# Altium footprint library amirlib.PcbLib: 456 footprints (part 22 of 29)
Each footprint in its own frame and in the unit in brackets; x right, y up, seen from the top. Pads: shape width x height; smd on the part's side, far side on the other; paste and mask are expansions set on the pad; w line width, h text height; cw(c..) or ccw(c..) is an arc to the next point about the centre after c.
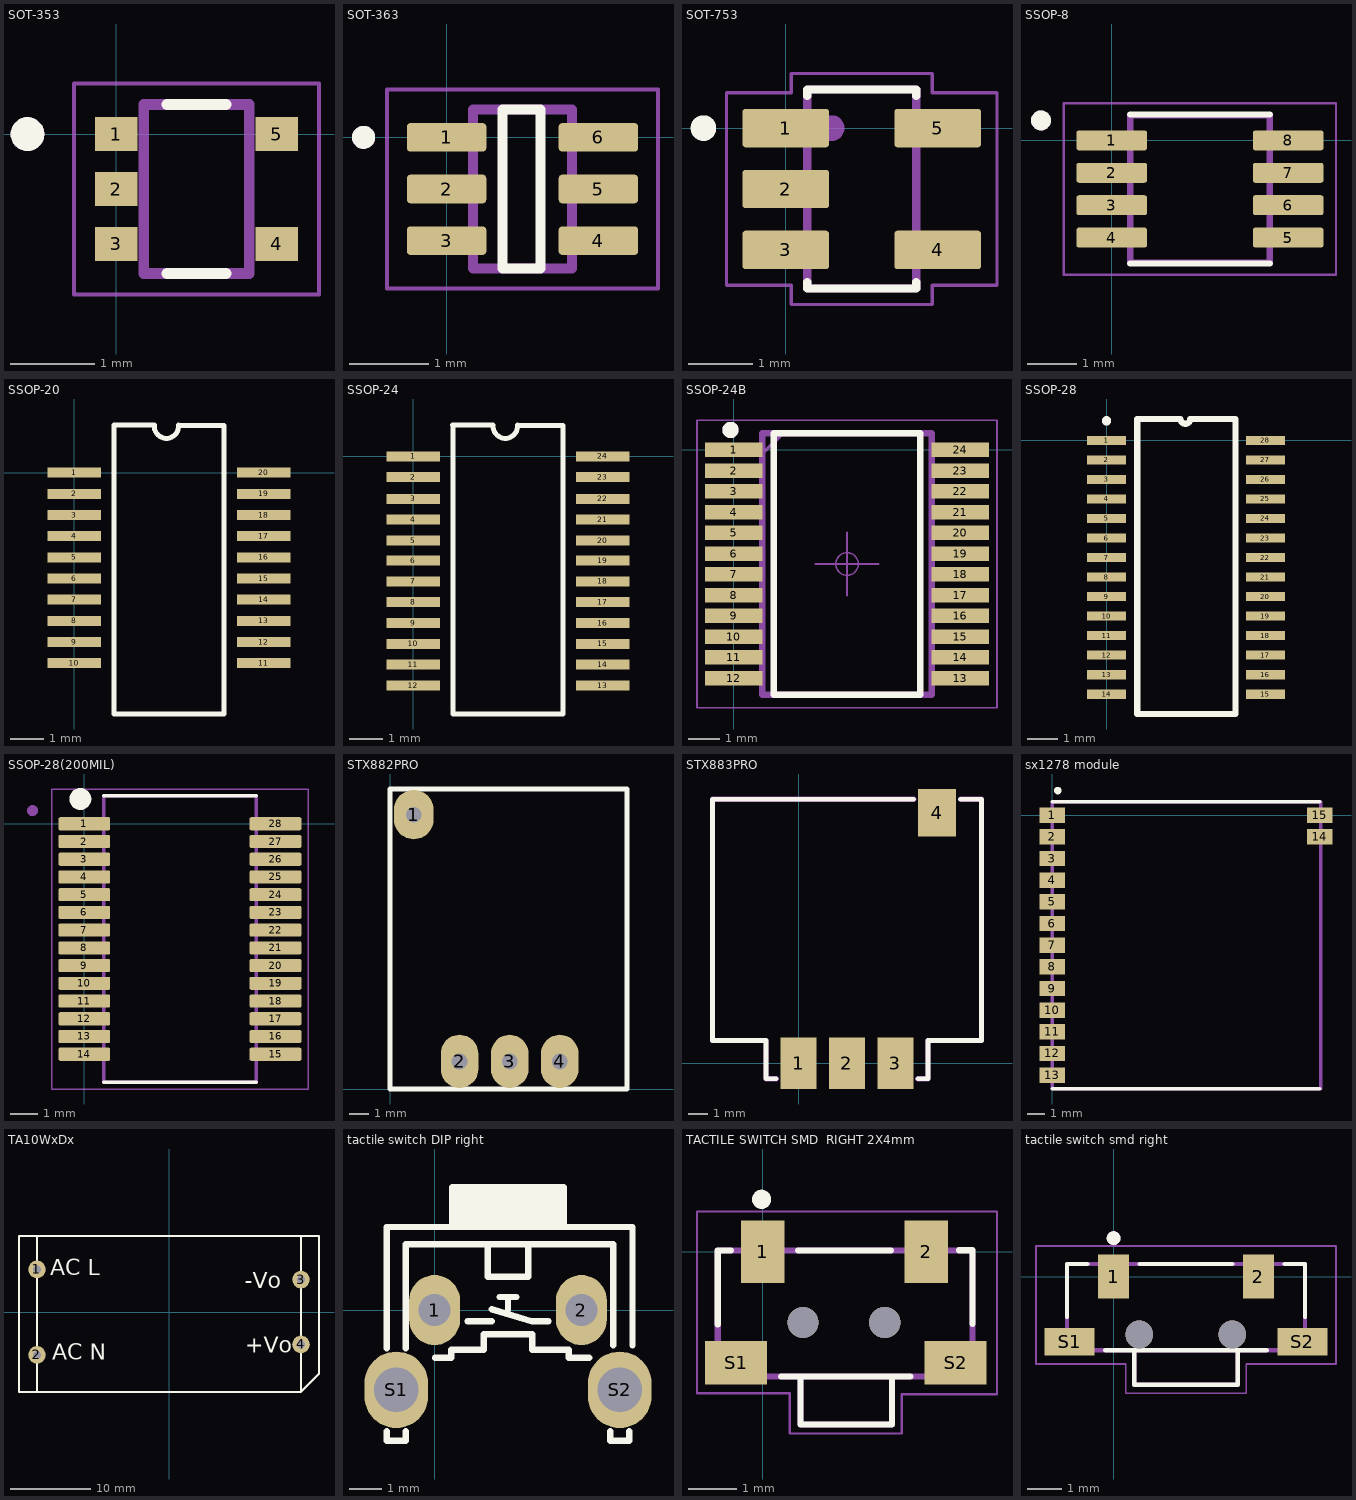
[diagram p21: the footprints below, top view; thin cyan lines are the x and y axes]

## SOT-353 [mm]
pads (5):
  rect 0.5x0.4 smd: 1(0,0) 2(0,-0.65) 3(0,-1.3) 4(1.9,-1.3) 5(1.9,0)
Top Overlay:
  circle w0.2: c-1.05,0 r0.1
  lines w0.127: 0.6,-1.65 1.3,-1.65 ; 0.6,0.35 1.3,0.35
Mechanical 13:
  circle w0.2: c-1.05,0 r0.1
  lines w0.127: 0.325,-1.65 0.325,0.35 1.575,0.35 1.575,-1.65 0.325,-1.65
Mechanical 15:
  lines w0.05: -0.5,-1.9 -0.5,0.6 2.4,0.6 2.4,-1.9 -0.5,-1.9
3D body "step_temp.STEP": height 1.1, standoff 0, extent -0.1,-1.65 2,0.35

## SOT-363 [mm]
pads (6):
  rrect25% 1x0.36 smd paste+0 mask+0.102: 1(0,0) 2(0,-0.65) 3(0,-1.3) 4(1.91,-1.3) 5(1.91,-0.65) 6(1.91,0)
Top Overlay:
  circle w0.15: c-1.045,0 r0.07
  lines w0.127: 0.701,-1.65 1.184,-1.65 1.184,0.35 0.701,0.35 0.701,-1.65
Mechanical 13:
  circle w0.15: c-1.045,0 r0.07
  lines w0.127: 0.33,-1.65 1.58,-1.65 1.58,0.35 0.33,0.35 0.33,-1.65
Mechanical 15:
  lines w0.05: -0.75,-1.9 -0.75,0.6 2.66,0.6 2.66,-1.9 -0.75,-1.9
3D body "MBT3906DW1T1G.STEP": height 1.1, standoff 0, extent -0.095,-1.65 2.005,0.35

## SOT-753 [mm]
pads (5):
  rrect15% 1.35x0.6 smd: 1(0,0) 2(0,-0.95) 3(0,-1.9) 4(2.37,-1.9) 5(2.37,0)
Top Overlay:
  circle w0.2: c-1.284,0 r0.1
  lines w0.127: 0.335,-2.4 0.335,-2.5 2.035,-2.5 2.035,-2.4 ; 0.335,0.5 0.335,0.6 2.035,0.6 2.035,0.5
Mechanical 13:
  circle w0.2: c0.716,0 r0.1
  lines w0.127: 0.335,-2.5 0.335,0.6 2.035,0.6 2.035,-2.5 0.335,-2.5
Mechanical 15:
  lines w0.05: -0.925,-2.45 0.085,-2.45 0.085,-2.75 2.285,-2.75 2.285,-2.45 3.295,-2.45 3.295,0.55 2.285,0.55 2.285,0.85 0.085,0.85 0.085,0.55 -0.925,0.55 -0.925,-2.45
3D body "step_temp.STEP": height 1.4, standoff 0, extent -0.215,-2.45 2.585,0.55

## SSOP-8 [mm]
pads (8):
  rrect25% 1.42x0.4 smd: 1(0,0) 2(0,-0.65) 3(0,-1.3) 4(0,-1.95) 5(3.54,-1.95) 6(3.54,-1.3) 7(3.54,-0.65) 8(3.54,0)
Top Overlay:
  circle w0.2: c-1.42,0.4 r0.1
  lines w0.127: 0.37,-2.47 3.17,-2.47 ; 0.37,0.52 3.17,0.52
Mechanical 13:
  circle w0.2: c-1.42,0.4 r0.1
  lines w0.127: 0.37,-2.45 3.17,-2.45 3.17,0.5 0.37,0.5 0.37,-2.45
Mechanical 15:
  lines w0.05: -0.96,-2.7 4.5,-2.7 4.5,0.75 -0.96,0.75 -0.96,-2.7
3D body "step_temp.STEP": height 1.3, standoff 0, extent -0.23,-2.45 3.77,0.5

## SSOP-20 [mm]
pads (20):
  rect 1.6x0.3 smd: 1(0,0) 2(0,-0.635) 3(0,-1.27) 4(0,-1.905) 5(0,-2.54) 6(0,-3.175) 7(0,-3.81) 8(0,-4.445) 9(0,-5.08) 10(0,-5.715) 11(5.69,-5.715) 12(5.69,-5.08) 13(5.69,-4.445) 14(5.69,-3.81) 15(5.69,-3.175) 16(5.69,-2.54) 17(5.69,-1.905) 18(5.69,-1.27) 19(5.69,-0.635) 20(5.69,0)
Top Overlay:
  lines w0.15: 1.188,1.425 2.404,1.425 ccw(c2.768,1.397) 3.132,1.425 ; 1.194,1.421 1.194,-7.239 4.496,-7.239 4.496,1.421 ; 3.132,1.422 3.604,1.422 4.488,1.422
3D body "User Library-SSOP20.STEP": height 1.53, standoff -0.15, extent 0.066,-7.163 5.979,1.497

## SSOP-24 [mm]
pads (24):
  rect 1.6x0.3 smd: 1(0,0) 2(0,-0.625) 3(0,-1.275) 4(0,-1.9) 5(0,-2.525) 6(0,-3.125) 7(0,-3.75) 8(0,-4.375) 9(0,-5) 10(0,-5.625) 11(0,-6.25) 12(0,-6.875) 13(5.69,-6.875) 14(5.69,-6.25) 15(5.69,-5.625) 16(5.69,-5) 17(5.69,-4.375) 18(5.69,-3.75) 19(5.69,-3.125) 20(5.69,-2.525) 21(5.69,-1.9) 22(5.69,-1.275) 23(5.69,-0.625) 24(5.69,0)
Top Overlay:
  lines w0.15: 1.185,0.934 2.401,0.934 ccw(c2.764,0.906) 3.128,0.934 ; 1.19,0.93 1.19,-7.73 4.492,-7.73 4.492,0.93 ; 3.128,0.931 3.6,0.931 4.484,0.931
3D body: height 0.7, standoff 0, extent 1.146,-7.721 4.446,0.879

## SSOP-24B [mm]
pads (24):
  rect 1.8x0.45 smd paste-2: 1(0,0) 2(0,-0.65) 3(0,-1.3) 4(0,-1.95) 5(0,-2.6) 6(0,-3.25) 7(0,-3.9) 8(0,-4.55) 9(0,-5.2) 10(0,-5.85) 11(0,-6.5) 12(0,-7.15) 13(7.1,-7.15) 14(7.1,-6.5) 15(7.1,-5.85) 16(7.1,-5.2) 17(7.1,-4.55) 18(7.1,-3.9) 19(7.1,-3.25) 20(7.1,-2.6) 21(7.1,-1.95) 22(7.1,-1.3) 23(7.1,-0.65) 24(7.1,0)
Top Overlay:
  circle w0.279: c-0.1,0.625 r0.114
  lines w0.2: 1.25,-7.675 1.25,0.525 5.85,0.525 5.85,-7.675 1.25,-7.675
Top Paste:
  drawing of 216 lines, arcs and shapes, not listed
Mechanical 13:
  circle w0.279: c-0.1,0.625 r0.114
  lines w0.1: 0.9,-0.125 1.55,0.525
  lines w0.2: 0.9,-7.675 0.9,0.525 6.2,0.525 6.2,-7.675 0.9,-7.675
Mechanical 15:
  circle w0.05: c3.55,-3.575 r0.354
  lines w0.05: 2.55,-3.575 4.55,-3.575 ; 3.55,-4.575 3.55,-2.575 ; -1.15,-8.075 -1.15,0.925 8.25,0.925 8.25,-8.075 -1.15,-8.075
3D body "step_temp.STEP": height 2, standoff 0, extent -0.55,-7.475 7.65,0.325

## SSOP-28 [mm]
pads (28):
  rect 1.27x0.3 smd: 1(0,0) 2(0,-0.635) 3(0,-1.27) 4(0,-1.905) 5(0,-2.54) 6(0,-3.175) 7(0,-3.81) 8(0,-4.445) 9(0,-5.08) 10(0,-5.715) 11(0,-6.35) 12(0,-6.985) 13(0,-7.62) 14(0,-8.255) 15(5.17,-8.255) 16(5.17,-7.62) 17(5.17,-6.985) 18(5.17,-6.35) 19(5.17,-5.715) 20(5.17,-5.08) 21(5.17,-4.445) 22(5.17,-3.81) 23(5.17,-3.175) 24(5.17,-2.54) 25(5.17,-1.905) 26(5.17,-1.27) 27(5.17,-0.635) 28(5.17,0)
Top Overlay:
  circle w0.254: c0,0.635 r0.025
  lines w0.2: 1,-8.9 1,0.7 2.404,0.7 ccw(c2.563,0.7) 2.722,0.7 4.2,0.7 4.2,-8.9 1,-8.9
3D body "User Library-SSOP28_LTC1923.STEP": height 1.75, standoff 0, extent -0.503,-9.106 5.685,0.876

## SSOP-28(200MIL) [mm]
pads (28):
  rrect25% 1.9x0.48 smd: 1(0,0) 2(0,-0.65) 3(0,-1.3) 4(0,-1.95) 5(0,-2.6) 6(0,-3.25) 7(0,-3.9) 8(0,-4.55) 9(0,-5.2) 10(0,-5.85) 11(0,-6.5) 12(0,-7.15) 13(0,-7.8) 14(0,-8.45) 15(7.01,-8.45) 16(7.01,-7.8) 17(7.01,-7.15) 18(7.01,-6.5) 19(7.01,-5.85) 20(7.01,-5.2) 21(7.01,-4.55) 22(7.01,-3.9) 23(7.01,-3.25) 24(7.01,-2.6) 25(7.01,-1.95) 26(7.01,-1.3) 27(7.01,-0.65) 28(7.01,0)
Top Overlay:
  circle w0.4: c-0.144,0.909 r0.2
  lines w0.127: 0.705,-9.475 6.305,-9.475 ; 0.705,1.025 6.305,1.025
Mechanical 13:
  circle w0.2: c-1.9,0.48 r0.1
  lines w0.127: 0.705,-9.475 6.305,-9.475 6.305,1.025 0.705,1.025 0.705,-9.475
Mechanical 15:
  lines w0.05: -1.2,-9.725 8.21,-9.725 8.21,1.275 -1.2,1.275 -1.2,-9.725
3D body "User Library-ssop28_model.STEP": height 1.96, standoff -0.04, extent -0.309,-9.323 7.491,0.877

## STX882PRO [mm]
pads (4):
  oval 2x2.5 hole 0.8: 1(1.2,13.9)
  oval 1.9x2.7 hole 0.8: 2(3.52,1.4) 3(6.06,1.4) 4(8.6,1.4)
Top Overlay:
  lines w0.254: 0,0 12,0 12,15.2 0,15.2 0,0
3D body: height 2, standoff 0, extent 0,0 12,15.2
3D body: height 2.1, standoff 0, extent 0.203,12.649 2.184,15.138
3D body: height 2.1, standoff 0, extent 2.529,0.155 4.511,2.645
3D body: height 2.1, standoff 0, extent 5.069,0.155 7.051,2.645
3D body: height 2.1, standoff 0, extent 7.609,0.155 9.591,2.645

## STX883PRO [mm]
pads (4):
  rect 1.9x2.7 smd paste+0 mask+0.051: 1(0,0) 2(2.54,0) 3(5.08,0)
  rect 2x2.5 smd paste+0 mask+0.051: 4(7.27,13.155)
Top Overlay:
  lines w0.254: -1.181,-0.813 -1.715,-0.813 -1.715,1.197 -4.525,1.197 -4.525,13.867 6.039,13.867 ; 6.261,-0.813 6.785,-0.813 6.795,-0.803 6.795,1.197 9.605,1.197 9.605,13.867 8.501,13.867
Mechanical 15:
  region: 6.039,13.74 -4.398,13.74 -4.398,1.325 -1.715,1.325 -1.69,1.325 -1.643,1.305 -1.607,1.269 -1.588,1.223 -1.588,1.198 -1.588,-0.685 -1.181,-0.685 -1.129,-0.685 -1.054,-0.76 -1.054,-0.865 -1.129,-0.939 -1.181,-0.939 -1.715,-0.939 -1.74,-0.939 -1.787,-0.92 -1.823,-0.884 -1.842,-0.838 -1.842,-0.812 -1.842,1.071 -4.525,1.071 -4.55,1.071 -4.597,1.09 -4.633,1.126 -4.652,1.172 -4.652,1.198 -4.652,13.867 -4.652,13.893 -4.633,13.939 -4.597,13.975 -4.55,13.994 -4.525,13.994 6.039,13.994 6.091,13.994 6.166,13.92 6.166,13.815 6.091,13.74
  region: 6.875,-0.902 6.866,-0.911 6.845,-0.925 6.822,-0.935 6.798,-0.939 6.785,-0.939 6.261,-0.939 6.236,-0.939 6.189,-0.92 6.153,-0.884 6.134,-0.838 6.134,-0.812 6.134,-0.787 6.153,-0.741 6.189,-0.705 6.236,-0.685 6.261,-0.685 6.668,-0.685 6.668,1.198 6.668,1.223 6.687,1.269 6.723,1.305 6.77,1.325 6.795,1.325 9.478,1.325 9.478,13.74 8.501,13.74 8.476,13.74 8.429,13.76 8.393,13.796 8.374,13.842 8.374,13.867 8.374,13.893 8.393,13.939 8.429,13.975 8.476,13.994 8.501,13.994 9.605,13.994 9.63,13.994 9.677,13.975 9.713,13.939 9.732,13.893 9.732,13.867 9.732,1.198 9.732,1.172 9.713,1.126 9.677,1.09 9.63,1.071 9.605,1.071 6.922,1.071 6.922,-0.803 6.922,-0.815 6.917,-0.84 6.908,-0.863 6.894,-0.883 6.885,-0.892

## sx1278 module [mm]
pads (15):
  rect 1.5x0.9 smd: 1(0,0) 2(0,-1.27) 3(0,-2.54) 4(0,-3.81) 5(0,-5.08) 6(0,-6.35) 7(0,-7.62) 8(0,-8.89) 9(0,-10.16) 10(0,-11.43) 11(0,-12.7) 12(0,-13.97) 13(0,-15.24) 14(15.7,-1.27) 15(15.7,0)
Top Overlay:
  circle w0.254: c0.33,1.448 r0.092
  lines w0.2: 0,-16.04 15.7,-16.04 ; 0,0.8 15.7,0.8
Mechanical 1:
  lines w0.2: 0,-16.053 15.748,-16.053 15.748,0.8 0,0.8 0,-16.053
3D body "SX1278_mod.STEP": height 2.15, standoff -0.03, extent -0.258,-15.627 16.26,1.372

## TA10WxDx [mm]
pads (4):
  round 2.2 hole 1 paste-2539.97 mask+0.051: 1(-16.528,5.35) 2(-16.528,-5.35) 3(16.528,4.05) 4(16.528,-4.05)
Top Overlay:
  lines w0.254: -16.528,9.465 -16.528,-9.991 -18.778,-9.991 ; 18.722,9.5 -18.778,9.5 -18.778,-9.991 ; -18.778,-9.991 16.528,-9.991 ; 16.528,-9.991 18.778,-7.741 18.778,9.49 16.528,9.49 16.528,-9.991
  text "+Vo" at 9.518,-5.115 h2.03
  text ".Comment" at -9.398,-0.711 h2.03
  text "-Vo" at 9.492,2.962 h2.03
  text "AC L" at -14.866,4.613 h2.03
  text "AC N" at -14.638,-5.978 h2.03

## tactile switch DIP right [mm]
pads (4):
  oval 1.6x2.2 hole 1 mask+0.1: 1(0,0) 2(4.6,0)
  oval 2x2.4 hole 1.4 mask+0.1: S1(-1.2,-2.5) S2(5.8,-2.5)
Top Overlay:
  region: 4.05,3.85 0.55,3.85 0.55,2.6 4.05,2.6
  lines w0.2: -1.5,-3.8 -1.5,-4.1 -0.9,-4.1 -0.9,-3.8 ; -1.5,-1.2 -1.5,2.6 6.2,2.6 6.2,-1.1 ; -0.9,-1.2 -0.9,2.057 1.665,2.057 ; 0.014,-1.499 0.522,-1.499 0.522,-1.245 1.538,-1.245 1.538,-0.762 3.062,-0.762 3.062,-1.245 4.205,-1.245 4.205,-1.499 4.84,-1.499 ; 0.55,2.6 0.55,3.85 4.05,3.85 4.05,2.6 ; 1.03,-0.356 1.792,-0.356 ; 1.792,0.025 3.062,-0.356 3.57,-0.356 ; 2.046,0.406 2.3,0.406 ; 2.3,0.025 2.3,0.406 ; 2.554,0.406 2.3,0.406 ; 5.5,-3.8 5.5,-4.1 6.1,-4.1 6.1,-3.8 ; 5.6,-1.1 5.6,2.057 2.935,2.057 ; 1.665,2.057 1.665,1.041 2.935,1.041 2.935,2.057 ; 1.665,2.057 2.935,2.057
3D body "SKHHLM.STEP": height 7.43, standoff -3.47, extent -1.949,-4.042 6.549,3.858

## TACTILE SWITCH SMD  RIGHT 2X4mm [mm]
pads (4):
  rect 0.9x1.3 smd: 1(0,0) 2(3.404,0)
  rect 1.3x0.9 smd: S1(-0.559,-2.311) S2(4.013,-2.311)
via 0.838,-1.473 diameter 0.65 hole 0.65
via 2.54,-1.473 diameter 0.65 hole 0.65
Top Overlay:
  circle w0.2: c-0.025,1.092 r0.1
  lines w0.127: -0.94,-1.511 -0.94,0.025 -0.66,0.025 ; 0.381,-2.599 3.073,-2.599 2.692,-2.599 2.692,-3.599 0.787,-3.599 0.787,-2.599 ; 0.737,0.025 2.667,0.025 ; 4.089,0.032 4.369,0.032 4.369,-1.505
Mechanical 13:
  lines w0.127: 0.348,-2.597 3.348,-2.597 ; -0.94,-2.597 0.787,-2.597 0.787,-3.597 2.692,-3.597 2.692,-2.597 4.369,-2.597 4.369,0.025 -0.94,0.025 -0.94,-2.597
Mechanical 15:
  lines w0.05: -1.372,-2.946 -1.372,0.838 4.877,0.838 4.877,-2.972 2.896,-2.972 2.896,-3.785 0.559,-3.785 0.559,-2.946 -1.372,-2.946
3D body "SWITCH_xiaobeibei.STEP": height 1.9, standoff -0.3, extent -0.76,-3.468 4.14,0.365

## tactile switch smd right [mm]
pads (4):
  rect 0.9x1.27 smd: 1(0,0) 2(4.2,0)
  rect 1.45x0.8 smd: S1(-1.275,-1.885) S2(5.475,-1.885)
via 0.741,-1.68 diameter 0.8 hole 0.8
via 3.441,-1.68 diameter 0.8 hole 0.8
Top Overlay:
  circle w0.2: c0,1.115 r0.1
  lines w0.127: -1.35,-1.171 -1.35,0.365 -0.763,0.365 ; -0.236,-2.135 0.6,-2.135 ; 0.764,0.365 3.437,0.365 ; 4.437,-2.135 3.6,-2.135 ; 4.964,0.365 5.55,0.365 5.55,-1.171 ; 0.6,-2.135 0.6,-3.135 3.6,-3.135 3.6,-2.135 ; 0.6,-2.135 3.6,-2.135
Mechanical 13:
  circle w0.2: c0,1.115 r0.1
  lines w0.127: 0.6,-2.135 0.6,-3.135 3.6,-3.135 3.6,-2.135 ; 0.6,-2.135 3.6,-2.135 ; 0.6,-2.135 -1.35,-2.135 -1.35,0.365 5.55,0.365 5.55,-2.135 3.6,-2.135
Mechanical 15:
  lines w0.05: -2.25,-2.535 0.35,-2.535 0.35,-3.385 3.85,-3.385 3.85,-2.535 6.45,-2.535 6.45,0.885 -2.25,0.885 -2.25,-2.535
3D body "TL3330AF130QG--3DModel-STEP-269445.STEP": height 3.5, standoff 0, extent -1.659,-3.28 6.141,0.229